# Altium footprint library Kamoer_NKP.PcbLib: 3 footprints
Each footprint in its own frame and in the unit in brackets; x right, y up, seen from the top. Pads: shape width x height; smd on the part's side, far side on the other; paste and mask are expansions set on the pad; w line width, h text height; cw(c..) or ccw(c..) is an arc to the next point about the centre after c.
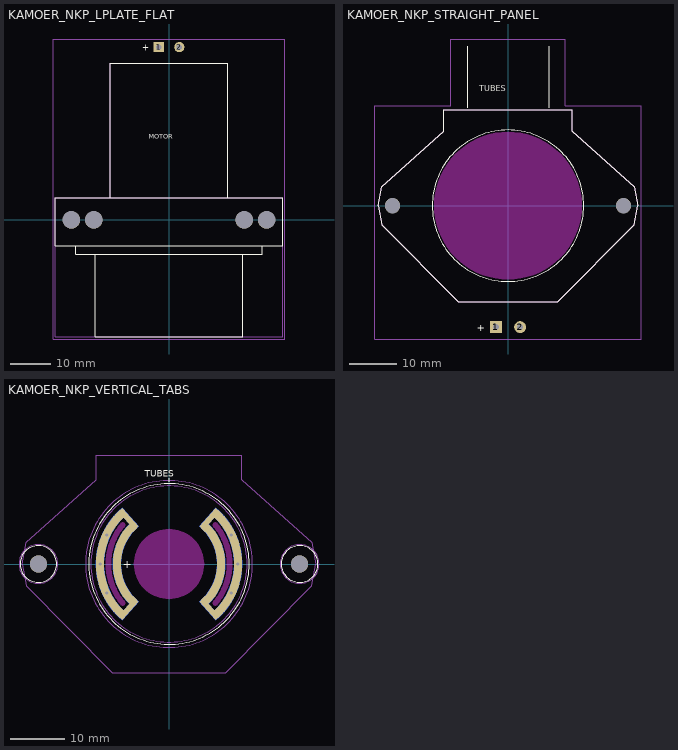
[diagram p0: the footprints below, top view; thin cyan lines are the x and y axes]

## KAMOER_NKP_LPLATE_FLAT [mm] "Kamoer NKP L plate, foot flat on PCB: 4x dia 4.3 at 48 and 37 mm; motor parallel to board; motor leads to 5.08 mm pads"
pads (6):
  rect 2.5x2.5 hole 1.3: 1(-2.54,42.5)
  round 2.5 hole 1.3: 2(2.54,42.5)
  round 4.3 hole 4.3 unplated: ""(-24,0) ""(-18.5,0) ""(18.5,0) ""(24,0)
Top Overlay:
  lines w0.15: -14.5,5.4 -14.5,38.5 14.5,38.5 14.5,5.4 ; -28,-6.4 -28,5.4 28,5.4 28,-6.4 -28,-6.4 ; -23,-8.5 -23,-6.4 23,-6.4 23,-8.5 -23,-8.5 ; -18.2,-28.8 -18.2,-8.5 18.2,-8.5 18.2,-28.8 -18.2,-28.8
  text "MOTOR" at -5,20 h1.2
  text "+" at -6.54,41.6 h1.5
Mechanical 1:
  lines w0.05: -28.5,-29.3 -28.5,44.5 28.5,44.5 28.5,-29.3 -28.5,-29.3
Mechanical 13:
  lines w0.1: -28,-28.8 -28,5.4 28,5.4 28,-28.8 -28,-28.8 ; -14.5,5.4 -14.5,38.5 14.5,38.5 14.5,5.4 -14.5,5.4
3D body: height 54, standoff 30, extent 6.7,-19.4 11.7,-14.4
3D body: height 54, standoff 30, extent -11.7,-19.4 -6.7,-14.4
3D body: height 35.2, standoff 6.2, extent -14.5,-5.1 14.5,38.5
3D body: height 40, standoff 0, extent -23,-28.8 23,-5.1
3D body: height 3.2, standoff 0, extent -28,-6.4 28,5.4

## KAMOER_NKP_STRAIGHT_PANEL [mm] "Kamoer NKP straight plate, PCB as panel: 2x M3 (dia 3.2) at 48.5 mm, dia 31 cutout for the dia 29 motor, motor leads to 5.08 mm pads"
pads (4):
  rect 2.5x2.5 hole 1.3: 1(-2.54,-25.5)
  round 2.5 hole 1.3: 2(2.54,-25.5)
  round 3.2 hole 3.2 unplated: ""(-24.25,0) ""(24.25,0)
Top Overlay:
  circle w0.15: c0,0 r15.9
  lines w0.15: -8.4,20.6 -8.4,33.5 ; 8.7,20.6 8.7,33.5 ; -27.25,0 -26.5,4 -13.5,15.6 -13.5,20.15 13.5,20.15 13.5,15.6 26.5,4 27.25,0 26.5,-4 10.5,-20.15 -10.5,-20.15 -26.5,-4 -27.25,0
  text "TUBES" at -6,24 h1.2
  text "+" at -6.54,-26.4 h1.5
Keep-Out Layer:
  board cut-out: 15.441,-1.351 15.5,0 15.441,1.351 15.265,2.692 14.972,4.012 14.565,5.301 14.048,6.551 13.423,7.75 12.697,8.89 11.874,9.963 10.96,10.96 9.963,11.874 8.89,12.697 7.75,13.423 6.551,14.048 5.301,14.565 4.012,14.972 2.692,15.265 1.351,15.441 0,15.5 -1.351,15.441 -2.692,15.265 -4.012,14.972 -5.301,14.565 -6.551,14.048 -7.75,13.423 -8.89,12.697 -9.963,11.874 -10.96,10.96 -11.874,9.963 -12.697,8.89 -13.423,7.75 -14.048,6.551 -14.565,5.301 -14.972,4.012 -15.265,2.692 -15.441,1.351 -15.5,0 -15.441,-1.351 -15.265,-2.692 -14.972,-4.012 -14.565,-5.301 -14.048,-6.551 -13.423,-7.75 -12.697,-8.89 -11.874,-9.963 -10.96,-10.96 -9.963,-11.874 -8.89,-12.697 -7.75,-13.423 -6.551,-14.048 -5.301,-14.565 -4.012,-14.972 -2.692,-15.265 -1.351,-15.441 0,-15.5 1.351,-15.441 2.692,-15.265 4.012,-14.972 5.301,-14.565 6.551,-14.048 7.75,-13.423 8.89,-12.697 9.963,-11.874 10.96,-10.96 11.874,-9.963 12.697,-8.89 13.423,-7.75 14.048,-6.551 14.565,-5.301 14.972,-4.012 15.265,-2.692
Mechanical 1:
  lines w0.05: -28,-28 -28,21 -12,21 -12,35 12,35 12,21 28,21 28,-28 -28,-28
Mechanical 13:
  lines w0.1: -27.25,0 -26.5,4 -13.5,15.6 -13.5,20.15 13.5,20.15 13.5,15.6 26.5,4 27.25,0 26.5,-4 10.5,-20.15 -10.5,-20.15 -26.5,-4 -27.25,0
3D body: height 42.4, standoff 0, extent -14.5,-14.5 14.5,14.5
3D body: height 15, standoff 8.6, extent 6.6,20.15 11,34
3D body: height 15, standoff 8.6, extent -10.6,20.15 -6.2,34
3D body: height 23.5, standoff 0, extent -27.25,-20.15 27.25,20.15

## KAMOER_NKP_VERTICAL_TABS [mm] "Kamoer NKP standing on its motor end: motor tabs soldered to copper arc pads around 1.0 mm routed arc slots at R 11.25 (+/-30 deg rotation), 2x M3 standoffs (40 mm) to the straight plate holes at 48.5 mm, dia 13 hole for the bearing boss"
pads (280):
  rect 1.5x1 smd: 1(-12.82,0) 1(-9.68,0) 2(9.68,0) 2(12.82,0)
  rect 1.5x1 smd far side: 1(-12.82,0) 1(-9.68,0) 2(9.68,0) 2(12.82,0)
  rect 1.5x1 smd rot 3: 1(-12.802,-0.671) 1(-9.667,-0.507) 2(9.667,0.507) 2(12.802,0.671)
  rect 1.5x1 smd far side rot 3: 1(-12.802,-0.671) 1(-9.667,-0.507) 2(9.667,0.507) 2(12.802,0.671)
  rect 1.5x1 smd rot 177: 1(-12.802,0.671) 1(-9.667,0.507) 2(9.667,-0.507) 2(12.802,-0.671)
  rect 1.5x1 smd far side rot 177: 1(-12.802,0.671) 1(-9.667,0.507) 2(9.667,-0.507) 2(12.802,-0.671)
  rect 1.2x1.2 hole 0.6: 1(-12.75,0)
  rect 1.5x1 smd rot 6: 1(-12.75,-1.34) 1(-9.627,-1.012) 2(9.627,1.012) 2(12.75,1.34)
  rect 1.5x1 smd far side rot 6: 1(-12.75,-1.34) 1(-9.627,-1.012) 2(9.627,1.012) 2(12.75,1.34)
  rect 1.5x1 smd rot 174: 1(-12.75,1.34) 1(-9.627,1.012) 2(9.627,-1.012) 2(12.75,-1.34)
  rect 1.5x1 smd far side rot 174: 1(-12.75,1.34) 1(-9.627,1.012) 2(9.627,-1.012) 2(12.75,-1.34)
  rect 1.5x1 smd rot 9: 1(-12.662,-2.005) 1(-9.561,-1.514) 2(9.561,1.514) 2(12.662,2.005)
  rect 1.5x1 smd far side rot 9: 1(-12.662,-2.005) 1(-9.561,-1.514) 2(9.561,1.514) 2(12.662,2.005)
  rect 1.5x1 smd rot 171: 1(-12.662,2.005) 1(-9.561,1.514) 2(9.561,-1.514) 2(12.662,-2.005)
  rect 1.5x1 smd far side rot 171: 1(-12.662,2.005) 1(-9.561,1.514) 2(9.561,-1.514) 2(12.662,-2.005)
  rect 1.5x1 smd rot 12: 1(-12.54,-2.665) 1(-9.468,-2.013) 2(9.468,2.013) 2(12.54,2.665)
  rect 1.5x1 smd far side rot 12: 1(-12.54,-2.665) 1(-9.468,-2.013) 2(9.468,2.013) 2(12.54,2.665)
  rect 1.5x1 smd rot 168: 1(-12.54,2.665) 1(-9.468,2.013) 2(9.468,-2.013) 2(12.54,-2.665)
  rect 1.5x1 smd far side rot 168: 1(-12.54,2.665) 1(-9.468,2.013) 2(9.468,-2.013) 2(12.54,-2.665)
  rect 1.5x1 smd rot 15: 1(-12.383,-3.318) 1(-9.35,-2.505) 2(9.35,2.505) 2(12.383,3.318)
  rect 1.5x1 smd far side rot 15: 1(-12.383,-3.318) 1(-9.35,-2.505) 2(9.35,2.505) 2(12.383,3.318)
  rect 1.5x1 smd rot 165: 1(-12.383,3.318) 1(-9.35,2.505) 2(9.35,-2.505) 2(12.383,-3.318)
  rect 1.5x1 smd far side rot 165: 1(-12.383,3.318) 1(-9.35,2.505) 2(9.35,-2.505) 2(12.383,-3.318)
  rect 1.5x1 smd rot 18: 1(-12.193,-3.962) 1(-9.206,-2.991) 2(9.206,2.991) 2(12.193,3.962)
  rect 1.5x1 smd far side rot 18: 1(-12.193,-3.962) 1(-9.206,-2.991) 2(9.206,2.991) 2(12.193,3.962)
  rect 1.5x1 smd rot 162: 1(-12.193,3.962) 1(-9.206,2.991) 2(9.206,-2.991) 2(12.193,-3.962)
  rect 1.5x1 smd far side rot 162: 1(-12.193,3.962) 1(-9.206,2.991) 2(9.206,-2.991) 2(12.193,-3.962)
  rect 1.5x1 smd rot 21: 1(-11.969,-4.594) 1(-9.037,-3.469) 2(9.037,3.469) 2(11.969,4.594)
  rect 1.5x1 smd far side rot 21: 1(-11.969,-4.594) 1(-9.037,-3.469) 2(9.037,3.469) 2(11.969,4.594)
  rect 1.5x1 smd rot 159: 1(-11.969,4.594) 1(-9.037,3.469) 2(9.037,-3.469) 2(11.969,-4.594)
  rect 1.5x1 smd far side rot 159: 1(-11.969,4.594) 1(-9.037,3.469) 2(9.037,-3.469) 2(11.969,-4.594)
  rect 1.5x1 smd rot 24: 1(-11.712,-5.214) 1(-8.843,-3.937) 2(8.843,3.937) 2(11.712,5.214)
  rect 1.5x1 smd far side rot 24: 1(-11.712,-5.214) 1(-8.843,-3.937) 2(8.843,3.937) 2(11.712,5.214)
  rect 1.5x1 smd rot 156: 1(-11.712,5.214) 1(-8.843,3.937) 2(8.843,-3.937) 2(11.712,-5.214)
  rect 1.5x1 smd far side rot 156: 1(-11.712,5.214) 1(-8.843,3.937) 2(8.843,-3.937) 2(11.712,-5.214)
  rect 1.2x1.2 hole 0.6 rot 25: 1(-11.555,-5.388)
  rect 1.2x1.2 hole 0.6 rot 155: 1(-11.555,5.388)
  rect 1.5x1 smd rot 27: 1(-11.423,-5.82) 1(-8.625,-4.395) 2(8.625,4.395) 2(11.423,5.82)
  rect 1.5x1 smd far side rot 27: 1(-11.423,-5.82) 1(-8.625,-4.395) 2(8.625,4.395) 2(11.423,5.82)
  rect 1.5x1 smd rot 153: 1(-11.423,5.82) 1(-8.625,4.395) 2(8.625,-4.395) 2(11.423,-5.82)
  rect 1.5x1 smd far side rot 153: 1(-11.423,5.82) 1(-8.625,4.395) 2(8.625,-4.395) 2(11.423,-5.82)
  rect 1.5x1 smd rot 30: 1(-11.102,-6.41) 1(-8.383,-4.84) 2(8.383,4.84) 2(11.102,6.41)
  rect 1.5x1 smd far side rot 30: 1(-11.102,-6.41) 1(-8.383,-4.84) 2(8.383,4.84) 2(11.102,6.41)
  rect 1.5x1 smd rot 150: 1(-11.102,6.41) 1(-8.383,4.84) 2(8.383,-4.84) 2(11.102,-6.41)
  rect 1.5x1 smd far side rot 150: 1(-11.102,6.41) 1(-8.383,4.84) 2(8.383,-4.84) 2(11.102,-6.41)
  rect 1.5x1 smd rot 33: 1(-10.752,-6.982) 1(-8.118,-5.272) 2(8.118,5.272) 2(10.752,6.982)
  rect 1.5x1 smd far side rot 33: 1(-10.752,-6.982) 1(-8.118,-5.272) 2(8.118,5.272) 2(10.752,6.982)
  rect 1.5x1 smd rot 147: 1(-10.752,6.982) 1(-8.118,5.272) 2(8.118,-5.272) 2(10.752,-6.982)
  rect 1.5x1 smd far side rot 147: 1(-10.752,6.982) 1(-8.118,5.272) 2(8.118,-5.272) 2(10.752,-6.982)
  rect 1.5x1 smd rot 36: 1(-10.372,-7.535) 1(-7.831,-5.69) 2(7.831,5.69) 2(10.372,7.535)
  rect 1.5x1 smd far side rot 36: 1(-10.372,-7.535) 1(-7.831,-5.69) 2(7.831,5.69) 2(10.372,7.535)
  rect 1.5x1 smd rot 144: 1(-10.372,7.535) 1(-7.831,5.69) 2(7.831,-5.69) 2(10.372,-7.535)
  rect 1.5x1 smd far side rot 144: 1(-10.372,7.535) 1(-7.831,5.69) 2(7.831,-5.69) 2(10.372,-7.535)
  rect 1.5x1 smd rot 39: 1(-9.963,-8.068) 1(-7.523,-6.092) 2(7.523,6.092) 2(9.963,8.068)
  rect 1.5x1 smd far side rot 39: 1(-9.963,-8.068) 1(-7.523,-6.092) 2(7.523,6.092) 2(9.963,8.068)
  rect 1.5x1 smd rot 141: 1(-9.963,8.068) 1(-7.523,6.092) 2(7.523,-6.092) 2(9.963,-8.068)
  rect 1.5x1 smd far side rot 141: 1(-9.963,8.068) 1(-7.523,6.092) 2(7.523,-6.092) 2(9.963,-8.068)
  rect 1.5x1 smd rot 42: 1(-9.527,-8.578) 1(-7.194,-6.477) 2(7.194,6.477) 2(9.527,8.578)
  rect 1.5x1 smd far side rot 42: 1(-9.527,-8.578) 1(-7.194,-6.477) 2(7.194,6.477) 2(9.527,8.578)
  rect 1.5x1 smd rot 138: 1(-9.527,8.578) 1(-7.194,6.477) 2(7.194,-6.477) 2(9.527,-8.578)
  rect 1.5x1 smd far side rot 138: 1(-9.527,8.578) 1(-7.194,6.477) 2(7.194,-6.477) 2(9.527,-8.578)
  rect 1.5x1 smd rot 45: 1(-9.065,-9.065) 1(-6.845,-6.845) 2(6.845,6.845) 2(9.065,9.065)
  rect 1.5x1 smd far side rot 45: 1(-9.065,-9.065) 1(-6.845,-6.845) 2(6.845,6.845) 2(9.065,9.065)
  rect 1.5x1 smd rot 135: 1(-9.065,9.065) 1(-6.845,6.845) 2(6.845,-6.845) 2(9.065,-9.065)
  rect 1.5x1 smd far side rot 135: 1(-9.065,9.065) 1(-6.845,6.845) 2(6.845,-6.845) 2(9.065,-9.065)
  rect 1.5x1 smd rot 48: 1(-8.578,-9.527) 1(-6.477,-7.194) 2(6.477,7.194) 2(8.578,9.527)
  rect 1.5x1 smd far side rot 48: 1(-8.578,-9.527) 1(-6.477,-7.194) 2(6.477,7.194) 2(8.578,9.527)
  rect 1.5x1 smd rot 132: 1(-8.578,9.527) 1(-6.477,7.194) 2(6.477,-7.194) 2(8.578,-9.527)
  rect 1.5x1 smd far side rot 132: 1(-8.578,9.527) 1(-6.477,7.194) 2(6.477,-7.194) 2(8.578,-9.527)
  rect 4.64x1 smd rot 48: 1(-7.528,-8.36) 2(7.528,8.36)
  rect 4.64x1 smd far side rot 48: 1(-7.528,-8.36) 2(7.528,8.36)
  rect 4.64x1 smd rot 132: 1(-7.528,8.36) 2(7.528,-8.36)
  rect 4.64x1 smd far side rot 132: 1(-7.528,8.36) 2(7.528,-8.36)
  round 1.2 hole 0.6: 2(11.555,-5.388) 2(11.555,5.388) 2(12.75,0)
  round 3.2 hole 3.2 unplated: ""(-24.25,0) ""(24.25,0)
Top Overlay:
  circle w0.15: c24.25,0 r3.4
  circle w0.15: c-24.25,0 r3.4
  circle w0.15: c0,0 r14.9
  lines w0.15: 0,15.3 0,15.9
  text "TUBES" at -4.5,16.2 h1.2
  text "+" at -8.6,-0.75 h1.5
Top Solder:
  drawing of 2 lines, arcs and shapes, not listed
Bottom Solder:
  drawing of 2 lines, arcs and shapes, not listed
Keep-Out Layer:
  drawing of 3 lines, arcs and shapes, not listed
Mechanical 1:
  circle w0.05: c24.25,0 r3.6
  circle w0.05: c-24.25,0 r3.6
  circle w0.05: c0,0 r15.5
Mechanical 13:
  circle w0.1: c0,0 r14.5
  lines w0.1: -27.25,0 -26.5,4 -13.5,15.6 -13.5,20.15 13.5,20.15 13.5,15.6 26.5,4 27.25,0 26.5,-4 10.5,-20.15 -10.5,-20.15 -26.5,-4 -27.25,0
3D body: height 55, standoff 48.6, extent 6.6,20.15 11,34
3D body: height 55, standoff 48.6, extent -10.6,20.15 -6.2,34
3D body: height 63.5, standoff 40, extent -27.25,-20.15 27.25,20.15
3D body: height 40, standoff 0, extent 21.5,-2.382 27,2.382
3D body: height 40, standoff 0, extent -27,-2.382 -21.5,2.382
3D body: height 40, standoff 1.3, extent -14.5,-14.5 14.5,14.5